# Altium footprint library MICROFJ-60035-TSV-TR.PcbLib: 3 footprints
Each footprint in its own frame and in the unit in brackets; x right, y up, seen from the top. Pads: shape width x height; smd on the part's side, far side on the other; paste and mask are expansions set on the pad; w line width, h text height; cw(c..) or ccw(c..) is an arc to the next point about the centre after c.
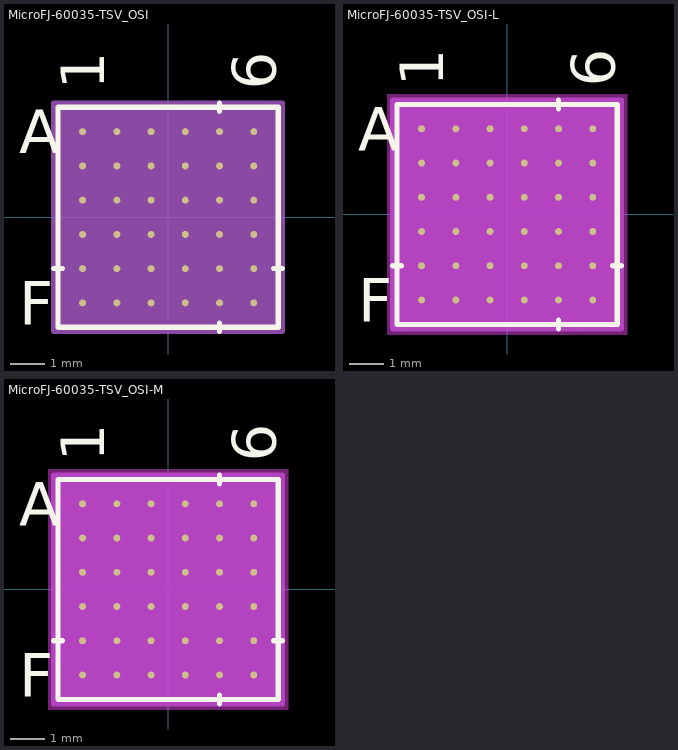
[diagram p0: the footprints below, top view; thin cyan lines are the x and y axes]

## MicroFJ-60035-TSV_OSI [mm]
pads (36):
  round 0.203 smd paste+0 mask+0: A1(-2.5,2.5) A2(-1.5,2.5) A3(-0.5,2.5) A4(0.5,2.5) A5(1.5,2.5) A6(2.5,2.5) B1(-2.5,1.5) B2(-1.5,1.5) B3(-0.5,1.5) B4(0.5,1.5) B5(1.5,1.5) B6(2.5,1.5) C1(-2.5,0.5) C2(-1.5,0.5) C3(-0.5,0.5) C4(0.5,0.5) C5(1.5,0.5) C6(2.5,0.5) D1(-2.5,-0.5) D2(-1.5,-0.5) D3(-0.5,-0.5) D4(0.5,-0.5) D5(1.5,-0.5) D6(2.5,-0.5) E1(-2.5,-1.5) E2(-1.5,-1.5) E3(-0.5,-1.5) E4(0.5,-1.5) E5(1.5,-1.5) E6(2.5,-1.5) F1(-2.5,-2.5) F2(-1.5,-2.5) F3(-0.5,-2.5) F4(0.5,-2.5) F5(1.5,-2.5) F6(2.5,-2.5)
Top Overlay:
  lines w0.152: -3.34,-1.5 -3.086,-1.5 ; 1.5,-3.34 1.5,-3.086 ; 1.5,3.086 1.5,3.34 ; 3.086,-1.5 3.34,-1.5 ; -3.213,-3.213 3.213,-3.213 3.213,3.213 -3.213,3.213 -3.213,-3.213
  text "A" at -4.356,1.865 h1.27
  text "F" at -4.356,-3.135 h1.27
  text "1" at -1.865,3.721 h1.27
  text "6" at 3.135,3.721 h1.27
  text ".Designator" at -3.492,-0.635 h1.27
Bottom Overlay:
  text "A" at -3.721,1.865 h1.27
  text "F" at -3.721,-3.135 h1.27
  text "1" at -3.135,3.721 h1.27
  text "6" at 1.865,3.721 h1.27
Mechanical 13:
  lines w0.025: -3.086,2.586 -2.586,3.086 ; -3.086,-3.086 3.086,-3.086 3.086,3.086 -3.086,3.086 -3.086,-3.086
  text ".Designator" at -3.492,-0.635 h1.27
  text "A" at -4.356,1.865 h1.27
  text "F" at -4.356,-3.135 h1.27
  text "1" at -1.865,3.721 h1.27
  text "6" at 3.135,3.721 h1.27
Mechanical 15:
  region: 3.34,-3.34 -3.34,-3.34 -3.34,3.34 3.34,3.34
  lines w0.152: -3.34,-3.34 -3.34,3.34 3.34,3.34 3.34,-3.34 -3.34,-3.34
3D body "MicroFJ-60035-TSV_OSI.step": height 0.79, standoff 0, extent -3.086,-3.086 3.086,3.086

## MicroFJ-60035-TSV_OSI-L [mm]
pads (36):
  round 0.203 smd paste+0 mask+0: A1(-2.5,2.5) A2(-1.5,2.5) A3(-0.5,2.5) A4(0.5,2.5) A5(1.5,2.5) A6(2.5,2.5) B1(-2.5,1.5) B2(-1.5,1.5) B3(-0.5,1.5) B4(0.5,1.5) B5(1.5,1.5) B6(2.5,1.5) C1(-2.5,0.5) C2(-1.5,0.5) C3(-0.5,0.5) C4(0.5,0.5) C5(1.5,0.5) C6(2.5,0.5) D1(-2.5,-0.5) D2(-1.5,-0.5) D3(-0.5,-0.5) D4(0.5,-0.5) D5(1.5,-0.5) D6(2.5,-0.5) E1(-2.5,-1.5) E2(-1.5,-1.5) E3(-0.5,-1.5) E4(0.5,-1.5) E5(1.5,-1.5) E6(2.5,-1.5) F1(-2.5,-2.5) F2(-1.5,-2.5) F3(-0.5,-2.5) F4(0.5,-2.5) F5(1.5,-2.5) F6(2.5,-2.5)
Top Overlay:
  lines w0.152: -3.34,-1.5 -3.086,-1.5 ; 1.5,-3.34 1.5,-3.086 ; 1.5,3.086 1.5,3.34 ; 3.086,-1.5 3.34,-1.5 ; -3.213,-3.213 3.213,-3.213 3.213,3.213 -3.213,3.213 -3.213,-3.213
  text "A" at -4.356,1.865 h1.27
  text "F" at -4.356,-3.135 h1.27
  text "1" at -1.865,3.721 h1.27
  text "6" at 3.135,3.721 h1.27
  text ".Designator" at -3.492,-0.635 h1.27
Bottom Overlay:
  text "A" at -3.721,1.865 h1.27
  text "F" at -3.721,-3.135 h1.27
  text "1" at -3.135,3.721 h1.27
  text "6" at 1.865,3.721 h1.27
Keep-Out Layer:
  region: -3.508,-3.508 -3.508,3.508 3.508,3.508 3.508,-3.508
Mechanical 13:
  lines w0.025: -3.086,2.586 -2.586,3.086 ; -3.086,-3.086 3.086,-3.086 3.086,3.086 -3.086,3.086 -3.086,-3.086
  text ".Designator" at -3.492,-0.635 h1.27
  text "A" at -4.356,1.865 h1.27
  text "F" at -4.356,-3.135 h1.27
  text "1" at -1.865,3.721 h1.27
  text "6" at 3.135,3.721 h1.27
Mechanical 15:
  region: 3.34,-3.34 -3.34,-3.34 -3.34,3.34 3.34,3.34
  lines w0.152: -3.34,-3.34 -3.34,3.34 3.34,3.34 3.34,-3.34 -3.34,-3.34
3D body "MicroFJ-60035-TSV_OSI.step": height 0.79, standoff 0, extent -3.086,-3.086 3.086,3.086

## MicroFJ-60035-TSV_OSI-M [mm]
pads (36):
  round 0.203 smd paste+0 mask+0: A1(-2.5,2.5) A2(-1.5,2.5) A3(-0.5,2.5) A4(0.5,2.5) A5(1.5,2.5) A6(2.5,2.5) B1(-2.5,1.5) B2(-1.5,1.5) B3(-0.5,1.5) B4(0.5,1.5) B5(1.5,1.5) B6(2.5,1.5) C1(-2.5,0.5) C2(-1.5,0.5) C3(-0.5,0.5) C4(0.5,0.5) C5(1.5,0.5) C6(2.5,0.5) D1(-2.5,-0.5) D2(-1.5,-0.5) D3(-0.5,-0.5) D4(0.5,-0.5) D5(1.5,-0.5) D6(2.5,-0.5) E1(-2.5,-1.5) E2(-1.5,-1.5) E3(-0.5,-1.5) E4(0.5,-1.5) E5(1.5,-1.5) E6(2.5,-1.5) F1(-2.5,-2.5) F2(-1.5,-2.5) F3(-0.5,-2.5) F4(0.5,-2.5) F5(1.5,-2.5) F6(2.5,-2.5)
Top Overlay:
  lines w0.152: -3.34,-1.5 -3.086,-1.5 ; 1.5,-3.34 1.5,-3.086 ; 1.5,3.086 1.5,3.34 ; 3.086,-1.5 3.34,-1.5 ; -3.213,-3.213 3.213,-3.213 3.213,3.213 -3.213,3.213 -3.213,-3.213
  text "A" at -4.356,1.865 h1.27
  text "F" at -4.356,-3.135 h1.27
  text "1" at -1.865,3.721 h1.27
  text "6" at 3.135,3.721 h1.27
  text ".Designator" at -3.492,-0.635 h1.27
Bottom Overlay:
  text "A" at -3.721,1.865 h1.27
  text "F" at -3.721,-3.135 h1.27
  text "1" at -3.135,3.721 h1.27
  text "6" at 1.865,3.721 h1.27
Keep-Out Layer:
  region: -3.508,-3.508 -3.508,3.508 3.508,3.508 3.508,-3.508
Mechanical 13:
  lines w0.025: -3.086,2.586 -2.586,3.086 ; -3.086,-3.086 3.086,-3.086 3.086,3.086 -3.086,3.086 -3.086,-3.086
  text ".Designator" at -3.492,-0.635 h1.27
  text "A" at -4.356,1.865 h1.27
  text "F" at -4.356,-3.135 h1.27
  text "1" at -1.865,3.721 h1.27
  text "6" at 3.135,3.721 h1.27
Mechanical 15:
  region: 3.34,-3.34 -3.34,-3.34 -3.34,3.34 3.34,3.34
  lines w0.152: -3.34,-3.34 -3.34,3.34 3.34,3.34 3.34,-3.34 -3.34,-3.34
3D body "MicroFJ-60035-TSV_OSI.step": height 0.79, standoff 0, extent -3.086,-3.086 3.086,3.086